# Altium footprint library PcbLib1.PcbLib: 24 footprints (part 2 of 2)
Each footprint in its own frame and in the unit in brackets; x right, y up, seen from the top. Pads: shape width x height; smd on the part's side, far side on the other; paste and mask are expansions set on the pad; w line width, h text height; cw(c..) or ccw(c..) is an arc to the next point about the centre after c.
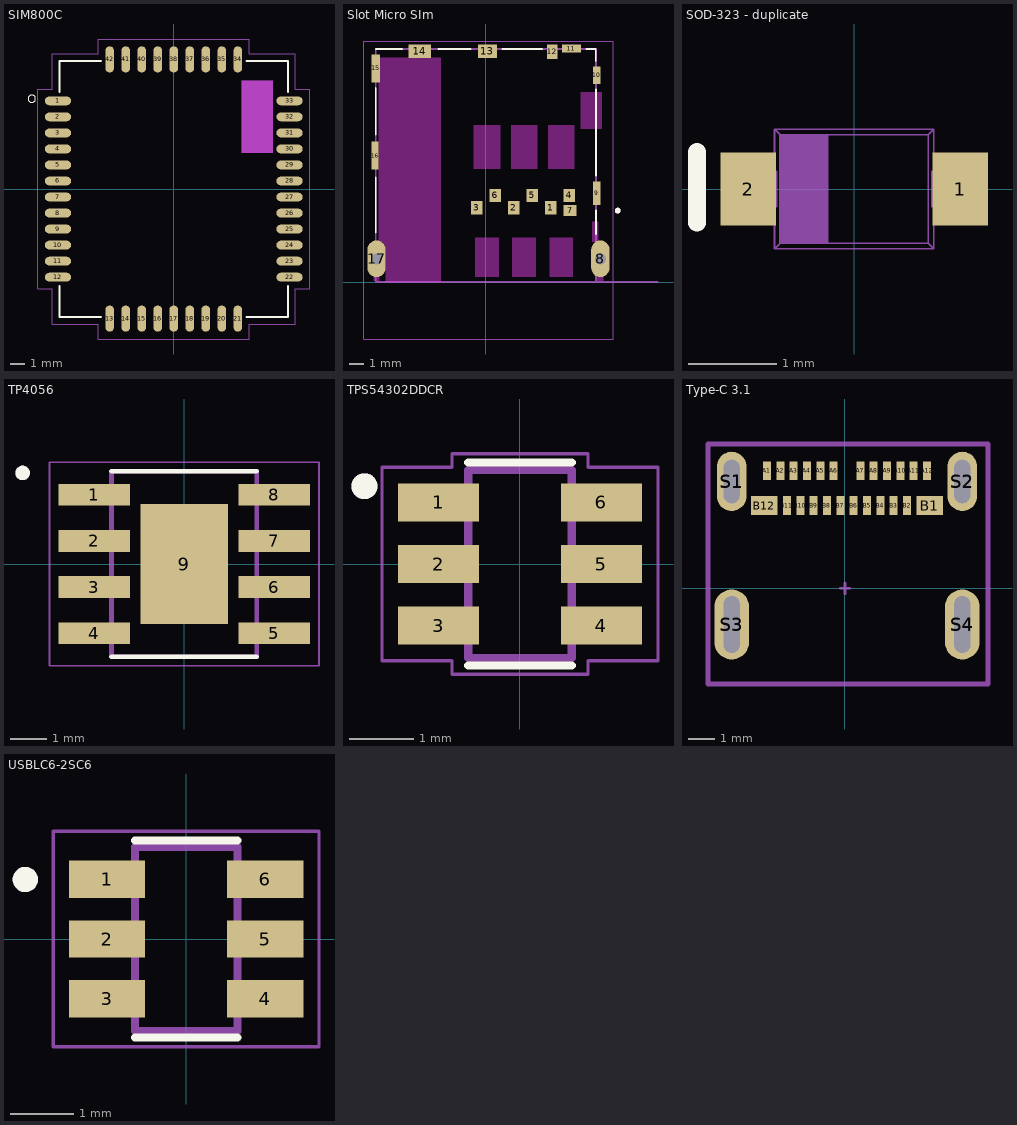
[diagram p1: the footprints below, top view; thin cyan lines are the x and y axes]

## PCBComponent_1 [mm]

## SIM800C [mm] "*LCC110P1570X1760X250-42N"
pads (42):
  oval 1.8x0.6 smd: 1(-7.95,6.05) 2(-7.95,4.95) 3(-7.95,3.85) 4(-7.95,2.75) 5(-7.95,1.65) 6(-7.95,0.55) 7(-7.95,-0.55) 8(-7.95,-1.65) 9(-7.95,-2.75) 10(-7.95,-3.85) 11(-7.95,-4.95) 12(-7.95,-6.05) 22(7.95,-6.05) 23(7.95,-4.95) 24(7.95,-3.85) 25(7.95,-2.75) 26(7.95,-1.65) 27(7.95,-0.55) 28(7.95,0.55) 29(7.95,1.65) 30(7.95,2.75) 31(7.95,3.85) 32(7.95,4.95) 33(7.95,6.05)
  oval 0.6x1.8 smd: 13(-4.4,-8.9) 14(-3.3,-8.9) 15(-2.2,-8.9) 16(-1.1,-8.9) 17(0,-8.9) 18(1.1,-8.9) 19(2.2,-8.9) 20(3.3,-8.9) 21(4.4,-8.9) 34(4.4,8.9) 35(3.3,8.9) 36(2.2,8.9) 37(1.1,8.9) 38(0,8.9) 39(-1.1,8.9) 40(-2.2,8.9) 41(-3.3,8.9) 42(-4.4,8.9)
Top Overlay:
  circle w0: c-9.75,6.2 r0.254
  lines w0.127: -7.85,-6.65 -7.85,-8.8 -5,-8.8 ; -7.85,6.65 -7.85,8.8 -5,8.8 ; 5,-8.8 7.85,-8.8 7.85,-6.65 ; 5,8.8 7.85,8.8 7.85,6.65
Keep-Out Layer:
  region: 4.656,7.43 6.8,7.43 6.8,2.483 4.656,2.483
  region: 4.656,7.43 6.8,7.43 6.8,2.483 4.656,2.483
  region: 4.656,7.43 6.8,7.43 6.8,2.483 4.656,2.483
Mechanical 16:
  region: 4.658,7.43 6.8,7.43 6.8,2.484 4.658,2.484
  lines w0.05: -9.35,-6.85 -8.35,-6.85 -8.35,-9.3 -5.2,-9.3 -5.2,-10.3 5.2,-10.3 5.2,-9.3 8.35,-9.3 8.35,-6.85 9.35,-6.85 9.35,6.85 8.35,6.85 8.35,9.3 5.2,9.3 5.2,10.3 -5.2,10.3 -5.2,9.3 -8.35,9.3 -8.35,6.85 -9.35,6.85 -9.35,-6.85
3D body "SIM800C--3DModel-STEP-1.STEP": height 2.5, standoff 0, extent -7.85,-8.8 7.85,8.8

## Slot Micro SIm [mm]
pads (17):
  rect 0.8x0.9 smd: 1(4.44,5.1) 2(1.9,5.1) 3(-0.64,5.1) 4(5.71,5.95) 5(3.17,5.95) 6(0.63,5.95)
  rect 0.9x0.75 smd: 7(5.77,4.925)
  oval 1.258x2.516 hole 0.75: 8(7.85,1.6) 17(-7.5,1.6)
  rect 0.54x1.6 smd: 9(7.6,6.1)
  rect 0.54x1.17 smd: 10(7.6,14.185)
  rect 1.33x0.55 smd: 11(5.865,16.005)
  rect 0.7x0.98 smd: 12(4.55,15.79)
  rect 1.3x0.91 smd: 13(0.1,15.825)
  rect 1.53x0.91 smd: 14(-4.535,15.825)
  rect 0.6x1.9 smd: 15(-7.55,14.65)
  rect 0.5x1.9 smd: 16(-7.6,8.68)
Top Overlay:
  circle w0.2: c9.035,4.9 r0.1
  lines w0.127: -7.55,3.4 -7.55,7.19 ; -7.55,10.11 -7.55,13.3 ; -7.55,15.98 -5.765,15.98 ; -3.265,15.98 -1.065,15.98 ; 1.135,15.98 3.835,15.98 ; 6.885,15.98 7.535,15.98 7.535,15.15 ; 7.55,3.3 7.55,4.9 ; 7.55,7.3 7.55,13.2
Keep-Out Layer:
  drawing of 66 lines, arcs and shapes, not listed
Mechanical 1:
  lines w0: -7.875,0.95 ccw(c-7.5,0.95) -7.5,0.575 ccw(c-7.5,0.95) -7.125,0.95 -7.125,2.25 ccw(c-7.5,2.25) -7.5,2.625 ccw(c-7.5,2.25) -7.875,2.25 -7.875,0.95 ; 7.475,0.95 ccw(c7.85,0.95) 7.85,0.575 ccw(c7.85,0.95) 8.225,0.95 8.225,2.25 ccw(c7.85,2.25) 7.85,2.625 ccw(c7.85,2.25) 7.475,2.25 7.475,0.95
Mechanical 4:
  circle w0.2: c9.035,4.9 r0.1
  circle w0.2: c9.035,4.9 r0.1
  lines w0.127: -7.55,0 -7.55,15.98 ; -7.55,0 7.55,0 ; -7.55,0 -7.55,15.98 ; -7.55,0 7.55,0 ; -7.55,15.98 7.55,15.98 ; -7.55,15.98 7.55,15.98 ; 7.55,0 7.55,15.98 ; 7.55,0 11.785,0 7.55,0 ; 7.55,0 7.55,15.98
  text "PCB EDGE" at -5.898,-3.358 h1.88
Mechanical 16:
  lines w0.05: -8.385,-3.9 -8.385,16.53 8.735,16.53 8.735,-3.9 -8.385,-3.9
3D body "2822541-1.SLDPRT": height 1.15, standoff -0.73, extent -7.616,0.254 7.874,16.254

## SOD-323 - duplicate [mm]
pads (2):
  rect 0.63x0.83 smd: 1(1.2,0) 2(-1.2,0)
Top Overlay:
  lines w0.2: -1.778,-0.381 -1.778,0.419
Top Assembly:
  rectangle: -0.839,0.613 -0.3,0.614
  rectangle: -0.838,-0.613 -0.3,-0.613
  region: -0.838,0.613 -0.3,0.613 -0.3,-0.613 -0.838,-0.613
  lines w0.02: -1.157,-0.2 -1.157,0.2 ; -1.11,-0.2 -1.11,0.2 ; -0.91,-0.2 -0.91,0.2 ; -0.9,-0.2 -0.9,-0.675 ; -0.9,0.2 -0.9,0.675 ; 0.9,-0.2 0.9,-0.675 ; 0.9,0.2 0.9,0.675 ; 0.91,-0.2 0.91,0.2 ; 1.11,-0.2 1.11,0.2 ; 1.157,-0.2 1.157,0.2 ; -0.9,-0.675 0.9,-0.675 ; -0.9,-0.675 -0.838,-0.613 ; -0.9,0.675 0.9,0.675 ; -0.9,0.675 -0.838,0.613 ; -0.838,-0.613 -0.3,-0.613 ; -0.838,-0.613 -0.838,0.613 ; -0.838,0.613 -0.3,0.613 ; -0.3,-0.613 0.838,-0.613 ; -0.3,-0.613 -0.3,0.613 ; -0.3,0.613 0.838,0.613 ; 0.838,-0.613 0.9,-0.675 ; 0.838,-0.613 0.838,0.613 ; 0.838,0.613 0.9,0.675 ; -1.3,-0.2 -0.879,-0.2 -0.879,0.2 -1.3,0.2 -1.3,-0.2 ; 0.879,-0.2 0.879,0.2 1.3,0.2 1.3,-0.2 0.879,-0.2
  text "'.Designator'" at 0.3,-0.5 h0.5
3D body "SW3dPS-SOD-323.STEP": height 1.1, standoff 0, extent -1.3,-0.675 1.3,0.675

## TP4056 [mm] "*SOP127P600X175-9N"
pads (9):
  rect 1.97x0.6 smd: 1(-2.475,1.905) 2(-2.475,0.635) 3(-2.475,-0.635) 4(-2.475,-1.905) 5(2.475,-1.905) 6(2.475,-0.635) 7(2.475,0.635) 8(2.475,1.905)
  rect 2.413x3.302 smd: 9(0,0)
Top Overlay:
  circle w0.2: c-4.445,2.505 r0.1
  lines w0.127: -2,-2.55 2,-2.55 ; -2,2.55 2,2.55
Top Paste:
  region: -0.645,0.82 0.645,0.82 0.645,-0.82 -0.645,-0.82
Mechanical 4:
  circle w0.2: c-4.445,2.505 r0.1
  circle w0.2: c-4.445,2.505 r0.1
  lines w0.127: -2,-2.55 2,-2.55 ; -2,-2.55 -2,2.55 ; -2,-2.55 2,-2.55 ; -2,-2.55 -2,2.55 ; -2,2.55 2,2.55 ; -2,2.55 2,2.55 ; 2,-2.55 2,2.55 ; 2,-2.55 2,2.55
Mechanical 16:
  lines w0.05: -3.71,-2.8 3.71,-2.8 3.71,2.8 -3.71,2.8 -3.71,-2.8
3D body "TP4056--3DModel-STEP-56544.STEP": height 1.75, standoff 0, extent -3,-2.45 3,2.45

## TPS54302DDCR [mm]
pads (6):
  rect 1.25x0.59 smd: 1(-1.255,0.95) 2(-1.255,0) 3(-1.255,-0.95) 4(1.255,-0.95) 5(1.255,0) 6(1.255,0.95)
Top Overlay:
  circle w0.2: c-2.4,1.2 r0.1
  lines w0.127: -0.8,-1.565 0.8,-1.565 ; -0.8,1.565 0.8,1.565
Mechanical 4:
  circle w0.2: c-2.4,1.2 r0.1
  circle w0.2: c-2.4,1.2 r0.1
  lines w0.127: -0.8,-1.45 -0.8,1.45 ; -0.8,-1.45 0.8,-1.45 ; -0.8,-1.45 -0.8,1.45 ; -0.8,-1.45 0.8,-1.45 ; -0.8,1.45 0.8,1.45 ; -0.8,1.45 0.8,1.45 ; 0.8,-1.45 0.8,1.45 ; 0.8,-1.45 0.8,1.45
Mechanical 16:
  lines w0.05: -2.13,-1.495 -2.13,1.495 -1.05,1.495 -1.05,1.7 1.05,1.7 1.05,1.495 2.13,1.495 2.13,-1.495 1.05,-1.495 1.05,-1.7 -1.05,-1.7 -1.05,-1.495 -2.13,-1.495
3D body "TPS54302DDCR (1).STEP": height 1.1, standoff 0, extent -1.4,-1.45 1.4,1.45

## Type-C 3.1 [mm] "105450-0101"
pads (32):
  rect 0.3x0.7 smd: A1(-2.924,4.405) A2(-2.424,4.405) A3(-1.924,4.405) A4(-1.424,4.405) A5(-0.924,4.405) A6(-0.424,4.405) A7(0.576,4.405) A8(1.076,4.405) A9(1.576,4.405) A10(2.076,4.405) A11(2.576,4.405) A12(3.076,4.405) B2(2.326,3.105) B3(1.826,3.105) B4(1.326,3.105) B5(0.826,3.105) B6(0.326,3.105) B7(-0.174,3.105) B8(-0.674,3.105) B9(-1.174,3.105) B10(-1.674,3.105) B11(-2.174,3.105)
  rect 1x0.7 smd: B1(3.176,3.105) B12(-3.024,3.105)
  oval 1.1x2.2 hole 0.6 slot 1.6 at 90 deg: S1(-4.244,3.995) S1(-4.244,4.02) S2(4.396,3.995) S2(4.396,4.02)
  oval 1.3x2.6 hole 0.6 slot 2.1 at 90 deg: S3(-4.244,-1.365) S3(-4.244,-1.34) S4(4.396,-1.365) S4(4.396,-1.34)
Mechanical 1:
  lines w0.1: -0.175,0 0.175,0 ; 0,-0.2 0,0.2
Top Assembly:
  lines w0.2: -5.131,-3.581 -5.131,5.41 5.359,5.41 5.359,-3.581 -5.131,-3.581
  text "'.Designator'" at -3.302,0 h0.7
3D body "1054500101--3DModel-STEP-56544.STEP": height 3.21, standoff -0.89, extent -4.47,-3.397 4.47,4.503

## USBLC6-2SC6 [mm] "*SOT95P280X145-6N"
pads (6):
  rect 1.21x0.59 smd: 1(-1.255,0.95) 2(-1.255,0) 3(-1.255,-0.95) 4(1.255,-0.95) 5(1.255,0) 6(1.255,0.95)
Top Overlay:
  circle w0.2: c-2.555,0.945 r0.1
  lines w0.127: -0.813,-1.565 0.813,-1.565 ; -0.813,1.565 0.813,1.565
Mechanical 4:
  circle w0.2: c-2.555,0.945 r0.1
  circle w0.2: c-2.555,0.945 r0.1
  lines w0.127: -0.813,-1.462 0.813,-1.462 ; -0.813,-1.462 -0.813,1.462 ; -0.813,-1.462 0.813,-1.462 ; -0.813,-1.462 -0.813,1.462 ; -0.813,1.462 0.813,1.462 ; -0.813,1.462 0.813,1.462 ; 0.813,-1.462 0.813,1.462 ; 0.813,-1.462 0.813,1.462
Mechanical 16:
  lines w0.05: -2.11,-1.713 -2.11,1.713 2.11,1.713 2.11,-1.713 -2.11,-1.713
3D body "usblc6-2sc6.stp": height 1.18, standoff 0, extent -1.4,-1.397 1.4,1.499